# EAGLE library part HR871150C (library HR871150C)
HanRun HR871150C。チップ側 TD+ (P1)・TD− (P2)・CT (P3、送受の中点タップを内部で共通)・RD+ (P4)・RD− (P5)。ケーブル側の中点タップ VC1+ (P7、J1/J2)・VC1− (P8、J3/J6)・VC2+ (P9、J4/J5)・VC2− (P10、J7/J8)、57 V・350 mA/タップ。黄 LED (11 アノード、12 カソード)、緑 LED (13 アノード、14 カソード)、シールド。Bob Smith 終端 (22 nF + 75 Ω × 4) と 1000 pF 2 kV (シールド) を内蔵。LED の極性 (どちらがアノードか) はデータシートの図で確かめること。
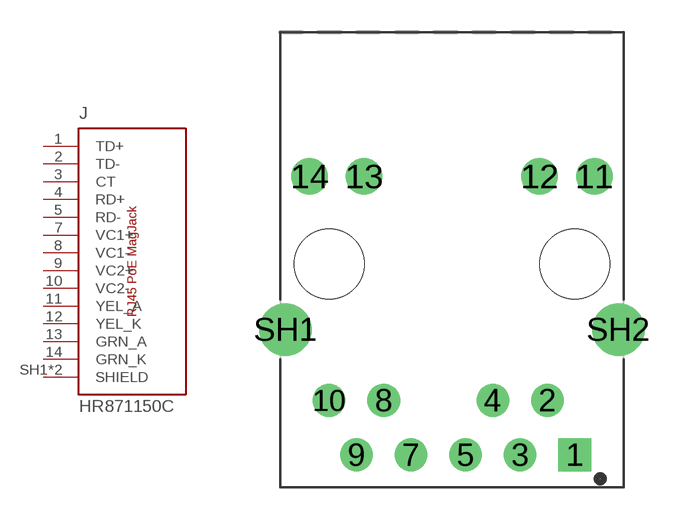
[diagram p0: symbol with the pads of RJ45-TH_HR871150C; footprint RJ45-TH_HR871150C]

Designator prefix J

## HR871150C (LCSC: C19724786; MANUFACTURER: HanRun; MPN: HR871150C)  [RJ45-TH_HR871150C]
1  TD+  pas
2  TD-  pas
3  CT  pas
4  RD+  pas
5  RD-  pas
7  VC1+  pas
8  VC1-  pas
9  VC2+  pas
10  VC2-  pas
11  YEL_A  pas
12  YEL_K  pas
13  GRN_A  pas
14  GRN_K  pas
SH1  SHIELD  pas
SH2  SHIELD  pas

## Footprint RJ45-TH_HR871150C (pad centres in mm)
HR871150C。原点は位置決めの穴 (φ3.25、めっきなし) 2 つの中点。+y が差し込み口 (基板の端) の向きで、口の前面は y = +10.80。信号ピン φ0.89 (穴 0.9)、ピッチ 1.27 の千鳥 (6 番は無い)、LED ピン φ1.02、シールド φ1.63。
drill 0.9 pad 1.52 square: 1 5.715,-8.89
drill 0.9 pad 1.52: 2 4.445,-6.35; 3 3.175,-8.89; 4 1.905,-6.35; 5 0.635,-8.89; 7 -1.905,-8.89; 8 -3.175,-6.35; 9 -4.445,-8.89; 10 -5.715,-6.35
drill 1.02 pad 1.7: 11 6.625,4.08; 12 4.085,4.08; 13 -4.085,4.08; 14 -6.625,4.08
drill 1.63 pad 2.16: SH1 -7.745,-3.05; SH2 7.745,-3.05
hole 3.25 at -5.715,0
hole 3.25 at 5.715,0